# Altium schematic symbol library 830069390.SchLib: 1 symbol
Pins are listed as number, name and electrical type; pins without a type are passive.

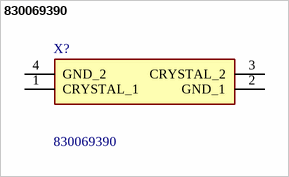
[diagram p0: symbol 830069390]

## 830069390
designator X?
32 MHz +/-20ppm Crystal 10pF 70 Ohms 4-SMD, No Lead; Manufacturer_Name: Wurth Elektronik; Geometry.Height: 0.6mm; Mouser Part Number: 710-830069390; Mouser Price/Stock: https://www.mouser.co.uk/ProductDetail/Wurth-Elektronik/830069390?qs=2WXlatMagcFUz20BwCFW%252BQ%3D%3D; Manufacturer_Part_Number: 830069390; Datasheet Link: https://www.we-online.com/catalog/datasheet/830069390.pdf
footprint 830069390
pins: 1 CRYSTAL_1, 2 GND_1, 3 CRYSTAL_2, 4 GND_2